# Altium footprint library ICs_VendorSpecific.PcbLib: 247 footprints (part 14 of 19)
Each footprint in its own frame and in the unit in brackets; x right, y up, seen from the top. Pads: shape width x height; smd on the part's side, far side on the other; paste and mask are expansions set on the pad; w line width, h text height; cw(c..) or ccw(c..) is an arc to the next point about the centre after c.
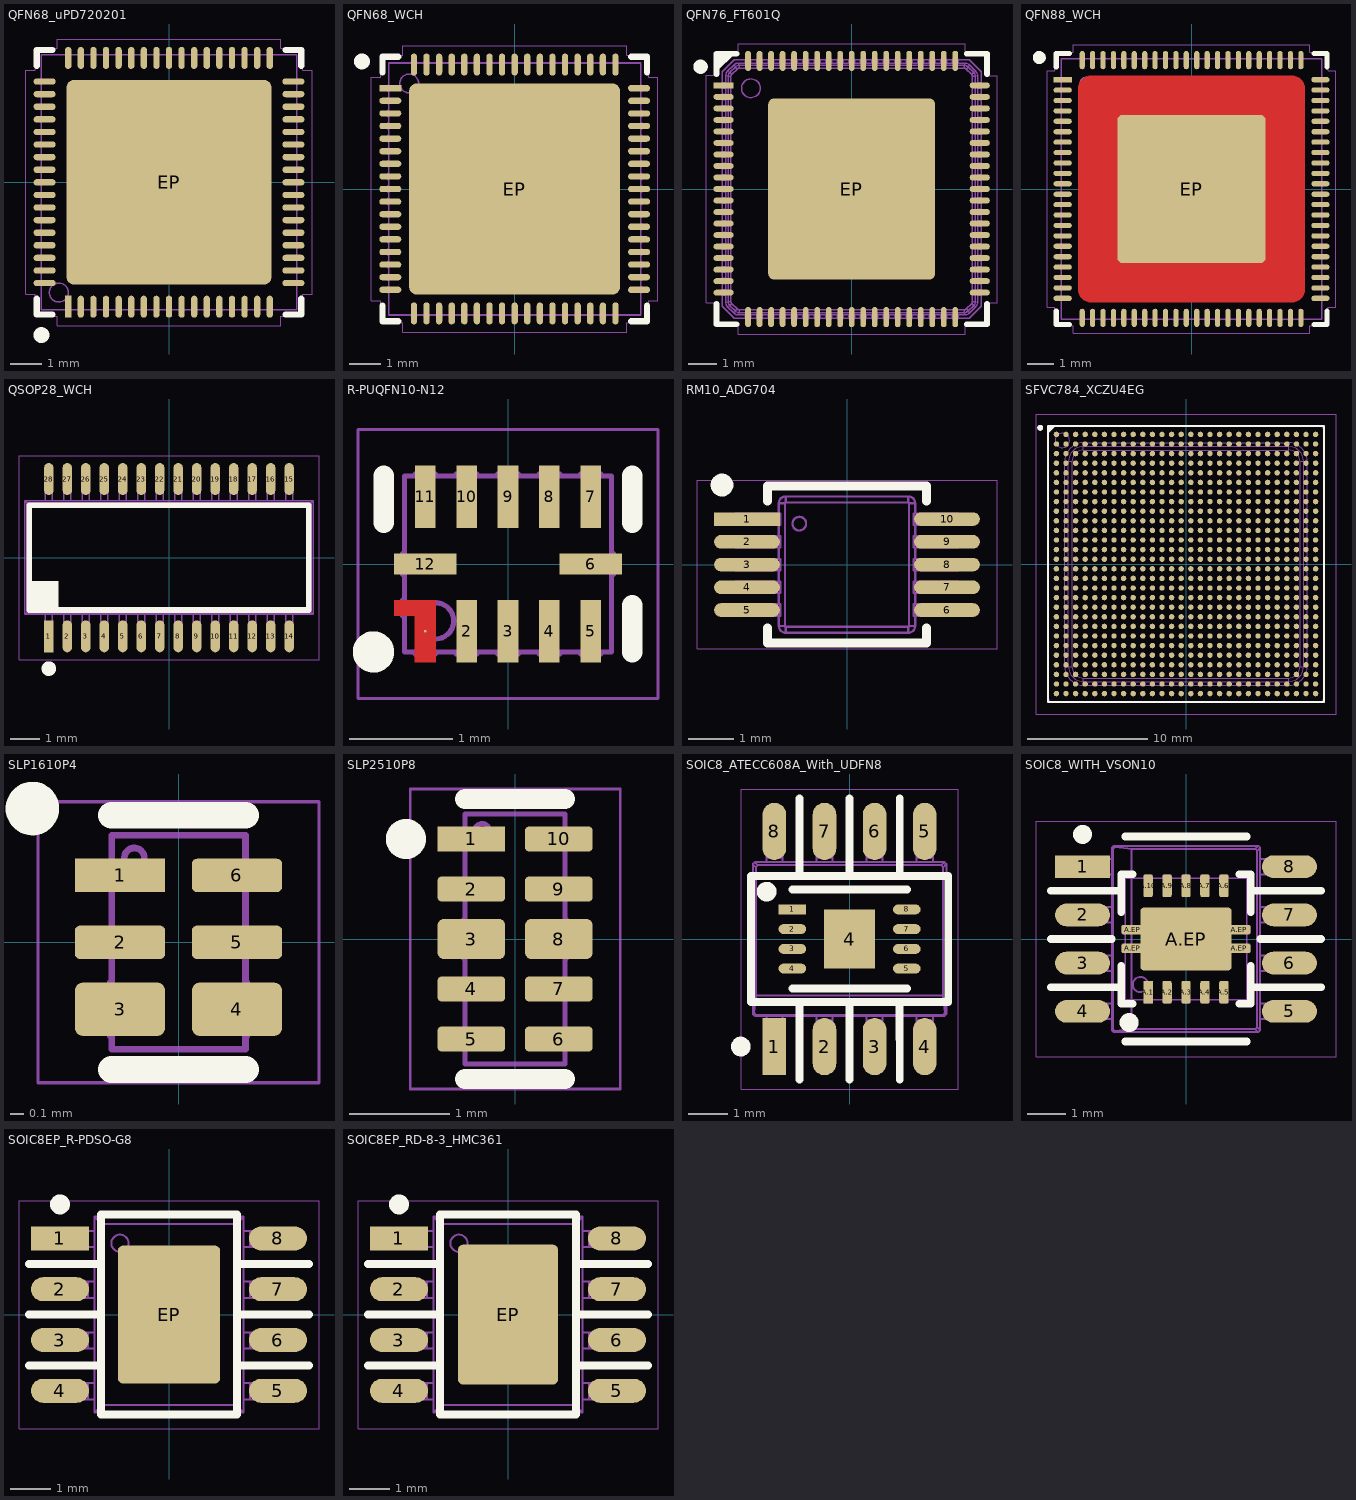
[diagram p13: the footprints below, top view; thin cyan lines are the x and y axes]

## QFN68_uPD720201 [mm] "QFN68, 8x8mm with 0.4mm pitch"
height 1
pads (69):
  rect 0.2x0.7 smd paste+0 mask+0.05: 1(-3.2,-3.95)
  oval 0.2x0.7 smd paste+0 mask+0.05: 2(-2.8,-3.95) 3(-2.4,-3.95) 4(-2,-3.95) 5(-1.6,-3.95) 6(-1.2,-3.95) 7(-0.8,-3.95) 8(-0.4,-3.95) 9(0,-3.95) 10(0.4,-3.95) 11(0.8,-3.95) 12(1.2,-3.95) 13(1.6,-3.95) 14(2,-3.95) 15(2.4,-3.95) 16(2.8,-3.95) 17(3.2,-3.95) 35(3.2,3.95) 36(2.8,3.95) 37(2.4,3.95) 38(2,3.95) 39(1.6,3.95) 40(1.2,3.95) 41(0.8,3.95) 42(0.4,3.95) 43(0,3.95) 44(-0.4,3.95) 45(-0.8,3.95) 46(-1.2,3.95) 47(-1.6,3.95) 48(-2,3.95) 49(-2.4,3.95) 50(-2.8,3.95) 51(-3.2,3.95)
  oval 0.7x0.2 smd paste+0 mask+0.05: 18(3.95,-3.2) 19(3.95,-2.8) 20(3.95,-2.4) 21(3.95,-2) 22(3.95,-1.6) 23(3.95,-1.2) 24(3.95,-0.8) 25(3.95,-0.4) 26(3.95,0) 27(3.95,0.4) 28(3.95,0.8) 29(3.95,1.2) 30(3.95,1.6) 31(3.95,2) 32(3.95,2.4) 33(3.95,2.8) 34(3.95,3.2) 52(-3.95,3.2) 53(-3.95,2.8) 54(-3.95,2.4) 55(-3.95,2) 56(-3.95,1.6) 57(-3.95,1.2) 58(-3.95,0.8) 59(-3.95,0.4) 60(-3.95,0) 61(-3.95,-0.4) 62(-3.95,-0.8) 63(-3.95,-1.2) 64(-3.95,-1.6) 65(-3.95,-2) 66(-3.95,-2.4) 67(-3.95,-2.8) 68(-3.95,-3.2)
  rrect7% 6.5x6.5 smd paste-50 mask+0.05: EP(0,0)
Top Overlay:
  circle w0.25: c-4.05,-4.85 r0.125
  lines w0.2: -4.2,-3.7 -4.2,-4.2 -3.7,-4.2 ; -4.2,3.7 -4.2,4.2 -3.7,4.2 ; 3.7,-4.2 4.2,-4.2 4.2,-3.7 ; 3.7,4.2 4.2,4.2 4.2,3.7
Top Paste:
  region: 2.7,2.7 2.2,2.7 2.2,2.2 2.7,2.2
  region: 2.7,-2.2 2.2,-2.2 2.2,-2.7 2.7,-2.7
  region: 2.7,-1.5 2.2,-1.5 2.2,-2 2.7,-2
  region: 2.7,-0.8 2.2,-0.8 2.2,-1.3 2.7,-1.3
  region: 2.7,1.3 2.2,1.3 2.2,0.8 2.7,0.8
  region: 2.7,2 2.2,2 2.2,1.5 2.7,1.5
  region: 2.7,-0.1 2.2,-0.1 2.2,-0.6 2.7,-0.6
  region: 2.7,0.6 2.2,0.6 2.2,0.1 2.7,0.1
  rectangle: -2.7,-2.7 -2.2,-2.2
  rectangle: -2.7,2.2 -2.2,2.7
  rectangle: -2.7,1.5 -2.2,2
  rectangle: -2.7,0.8 -2.2,1.3
  rectangle: -2.7,-1.3 -2.2,-0.8
  rectangle: -2.7,-2 -2.2,-1.5
  rectangle: -2.7,0.1 -2.2,0.6
  rectangle: -2.7,-0.6 -2.2,-0.1
  region: -0.8,-2.2 -1.3,-2.2 -1.3,-2.7 -0.8,-2.7
  rectangle: -2,-2.7 -1.5,-2.2
  region: 2,-2.2 1.5,-2.2 1.5,-2.7 2,-2.7
  rectangle: 0.8,-2.7 1.3,-2.2
  region: 0.6,-2.2 0.1,-2.2 0.1,-2.7 0.6,-2.7
  rectangle: -0.6,-2.7 -0.1,-2.2
  rectangle: 0.8,2.2 1.3,2.7
  region: 2,2.7 1.5,2.7 1.5,2.2 2,2.2
  rectangle: -2,2.2 -1.5,2.7
  region: -0.8,2.7 -1.3,2.7 -1.3,2.2 -0.8,2.2
  rectangle: -0.6,2.2 -0.1,2.7
  region: 0.6,2.7 0.1,2.7 0.1,2.2 0.6,2.2
  rectangle: 0.8,1.5 1.3,2
  rectangle: 0.8,0.8 1.3,1.3
  region: 2,1.3 1.5,1.3 1.5,0.8 2,0.8
  region: 2,2 1.5,2 1.5,1.5 2,1.5
  rectangle: 0.8,-1.3 1.3,-0.8
  rectangle: 0.8,-2 1.3,-1.5
  region: 2,-1.5 1.5,-1.5 1.5,-2 2,-2
  region: 2,-0.8 1.5,-0.8 1.5,-1.3 2,-1.3
  rectangle: 0.8,0.1 1.3,0.6
  rectangle: 0.8,-0.6 1.3,-0.1
  region: 2,-0.1 1.5,-0.1 1.5,-0.6 2,-0.6
  region: 2,0.6 1.5,0.6 1.5,0.1 2,0.1
  rectangle: -2,1.5 -1.5,2
  rectangle: -2,0.8 -1.5,1.3
  region: -0.8,1.3 -1.3,1.3 -1.3,0.8 -0.8,0.8
  region: -0.8,2 -1.3,2 -1.3,1.5 -0.8,1.5
  rectangle: -2,-1.3 -1.5,-0.8
  rectangle: -2,-2 -1.5,-1.5
  region: -0.8,-1.5 -1.3,-1.5 -1.3,-2 -0.8,-2
  region: -0.8,-0.8 -1.3,-0.8 -1.3,-1.3 -0.8,-1.3
  rectangle: -2,0.1 -1.5,0.6
  rectangle: -2,-0.6 -1.5,-0.1
  region: -0.8,-0.1 -1.3,-0.1 -1.3,-0.6 -0.8,-0.6
  region: -0.8,0.6 -1.3,0.6 -1.3,0.1 -0.8,0.1
  rectangle: -0.6,1.5 -0.1,2
  rectangle: -0.6,0.8 -0.1,1.3
  region: 0.6,1.3 0.1,1.3 0.1,0.8 0.6,0.8
  region: 0.6,2 0.1,2 0.1,1.5 0.6,1.5
  rectangle: -0.6,-1.3 -0.1,-0.8
  rectangle: -0.6,-2 -0.1,-1.5
  region: 0.6,-1.5 0.1,-1.5 0.1,-2 0.6,-2
  region: 0.6,-0.8 0.1,-0.8 0.1,-1.3 0.6,-1.3
  rectangle: -0.6,0.1 -0.1,0.6
  rectangle: -0.6,-0.6 -0.1,-0.1
  region: 0.6,-0.1 0.1,-0.1 0.1,-0.6 0.6,-0.6
  region: 0.6,0.6 0.1,0.6 0.1,0.1 0.6,0.1
Top Courtyard:
  lines w0.025: -4.55,-3.55 -4.55,3.55 -4.25,3.55 -4.25,4.25 -3.55,4.25 -3.55,4.55 3.55,4.55 3.55,4.25 4.25,4.25 4.25,3.55 4.55,3.55 4.55,-3.55 4.25,-3.55 4.25,-4.25 3.55,-4.25 3.55,-4.55 -3.55,-4.55 -3.55,-4.25 -4.25,-4.25 -4.25,-3.55 -4.55,-3.55
Top Assembly:
  drawing of 209 lines, arcs and shapes, not listed
  text ".Designator" at -4.511,-0.453 h2
3D body "uPD720201.STEP": height 0.9, standoff 0, extent -4.025,-4.025 4.025,4.025

## QFN68_WCH [mm] "QFN68, 8x8mm with 0.4mm pitch"
height 0.75
pads (69):
  rect 0.7x0.2 smd paste+0 mask+0.05: 1(-3.95,3.2)
  oval 0.7x0.2 smd paste+0 mask+0.05: 2(-3.95,2.8) 3(-3.95,2.4) 4(-3.95,2) 5(-3.95,1.6) 6(-3.95,1.2) 7(-3.95,0.8) 8(-3.95,0.4) 9(-3.95,0) 10(-3.95,-0.4) 11(-3.95,-0.8) 12(-3.95,-1.2) 13(-3.95,-1.6) 14(-3.95,-2) 15(-3.95,-2.4) 16(-3.95,-2.8) 17(-3.95,-3.2) 35(3.95,-3.2) 36(3.95,-2.8) 37(3.95,-2.4) 38(3.95,-2) 39(3.95,-1.6) 40(3.95,-1.2) 41(3.95,-0.8) 42(3.95,-0.4) 43(3.95,0) 44(3.95,0.4) 45(3.95,0.8) 46(3.95,1.2) 47(3.95,1.6) 48(3.95,2) 49(3.95,2.4) 50(3.95,2.8) 51(3.95,3.2)
  oval 0.2x0.7 smd paste+0 mask+0.05: 18(-3.2,-3.95) 19(-2.8,-3.95) 20(-2.4,-3.95) 21(-2,-3.95) 22(-1.6,-3.95) 23(-1.2,-3.95) 24(-0.8,-3.95) 25(-0.4,-3.95) 26(0,-3.95) 27(0.4,-3.95) 28(0.8,-3.95) 29(1.2,-3.95) 30(1.6,-3.95) 31(2,-3.95) 32(2.4,-3.95) 33(2.8,-3.95) 34(3.2,-3.95) 52(3.2,3.95) 53(2.8,3.95) 54(2.4,3.95) 55(2,3.95) 56(1.6,3.95) 57(1.2,3.95) 58(0.8,3.95) 59(0.4,3.95) 60(0,3.95) 61(-0.4,3.95) 62(-0.8,3.95) 63(-1.2,3.95) 64(-1.6,3.95) 65(-2,3.95) 66(-2.4,3.95) 67(-2.8,3.95) 68(-3.2,3.95)
  rrect7% 6.7x6.7 smd paste-50 mask+0.05: EP(0,0)
Top Overlay:
  circle w0.25: c-4.85,4.05 r0.125
  lines w0.2: -4.2,-3.7 -4.2,-4.2 -3.7,-4.2 ; -4.2,3.7 -4.2,4.2 -3.7,4.2 ; 3.7,-4.2 4.2,-4.2 4.2,-3.7 ; 3.7,4.2 4.2,4.2 4.2,3.7
Top Paste:
  region: 0.15,0.95 0.15,0.15 0.95,0.15 0.95,0.95
  region: -0.95,0.95 -0.95,0.15 -0.15,0.15 -0.15,0.95
  region: -0.15,-0.95 -0.15,-0.15 -0.95,-0.15 -0.95,-0.95
  region: 0.95,-0.95 0.95,-0.15 0.15,-0.15 0.15,-0.95
  region: 0.15,2.05 0.15,1.25 0.95,1.25 0.95,2.05
  region: -0.95,2.05 -0.95,1.25 -0.15,1.25 -0.15,2.05
  region: 0.15,3.15 0.15,2.35 0.95,2.35 0.95,3.15
  region: -0.95,3.15 -0.95,2.35 -0.15,2.35 -0.15,3.15
  region: -0.15,-2.05 -0.15,-1.25 -0.95,-1.25 -0.95,-2.05
  region: 0.95,-2.05 0.95,-1.25 0.15,-1.25 0.15,-2.05
  region: -0.15,-3.15 -0.15,-2.35 -0.95,-2.35 -0.95,-3.15
  region: 0.95,-3.15 0.95,-2.35 0.15,-2.35 0.15,-3.15
  region: 1.25,0.95 1.25,0.15 2.05,0.15 2.05,0.95
  region: 2.05,-0.95 2.05,-0.15 1.25,-0.15 1.25,-0.95
  region: 1.25,2.05 1.25,1.25 2.05,1.25 2.05,2.05
  region: 1.25,3.15 1.25,2.35 2.05,2.35 2.05,3.15
  region: 2.05,-2.05 2.05,-1.25 1.25,-1.25 1.25,-2.05
  region: 2.05,-3.15 2.05,-2.35 1.25,-2.35 1.25,-3.15
  region: 2.35,0.95 2.35,0.15 3.15,0.15 3.15,0.95
  region: 3.15,-0.95 3.15,-0.15 2.35,-0.15 2.35,-0.95
  region: 2.35,2.05 2.35,1.25 3.15,1.25 3.15,2.05
  region: 2.35,3.15 2.35,2.35 3.15,2.35 3.15,3.15
  region: 3.15,-2.05 3.15,-1.25 2.35,-1.25 2.35,-2.05
  region: 3.15,-3.15 3.15,-2.35 2.35,-2.35 2.35,-3.15
  region: -2.05,0.95 -2.05,0.15 -1.25,0.15 -1.25,0.95
  region: -1.25,-0.95 -1.25,-0.15 -2.05,-0.15 -2.05,-0.95
  region: -2.05,2.05 -2.05,1.25 -1.25,1.25 -1.25,2.05
  region: -2.05,3.15 -2.05,2.35 -1.25,2.35 -1.25,3.15
  region: -1.25,-2.05 -1.25,-1.25 -2.05,-1.25 -2.05,-2.05
  region: -1.25,-3.15 -1.25,-2.35 -2.05,-2.35 -2.05,-3.15
  region: -3.15,0.95 -3.15,0.15 -2.35,0.15 -2.35,0.95
  region: -2.35,-0.95 -2.35,-0.15 -3.15,-0.15 -3.15,-0.95
  region: -3.15,2.05 -3.15,1.25 -2.35,1.25 -2.35,2.05
  region: -3.15,3.15 -3.15,2.35 -2.35,2.35 -2.35,3.15
  region: -2.35,-2.05 -2.35,-1.25 -3.15,-1.25 -3.15,-2.05
  region: -2.35,-3.15 -2.35,-2.35 -3.15,-2.35 -3.15,-3.15
Top Courtyard:
  lines w0.025: -4.55,-3.55 -4.55,3.55 -4.25,3.55 -4.25,4.25 -3.55,4.25 -3.55,4.55 3.55,4.55 3.55,4.25 4.25,4.25 4.25,3.55 4.55,3.55 4.55,-3.55 4.25,-3.55 4.25,-4.25 3.55,-4.25 3.55,-4.55 -3.55,-4.55 -3.55,-4.25 -4.25,-4.25 -4.25,-3.55 -4.55,-3.55
Top Assembly:
  drawing of 209 lines, arcs and shapes, not listed
  text ".Designator" at -4.511,-0.453 h2
3D body "QFN-68_WCH.x_t": height 0.78, standoff 0, extent -4.025,-4.025 4.025,4.025

## QFN76_FT601Q [mm] "QFN76, 9x9mm with 0.4mm pitch"
height 1
pads (77):
  rect 0.7x0.2 smd paste+0 mask+0.05: 1(-4.45,3.6)
  oval 0.7x0.2 smd paste+0 mask+0.05: 2(-4.45,3.2) 3(-4.45,2.8) 4(-4.45,2.4) 5(-4.45,2) 6(-4.45,1.6) 7(-4.45,1.2) 8(-4.45,0.8) 9(-4.45,0.4) 10(-4.45,0) 11(-4.45,-0.4) 12(-4.45,-0.8) 13(-4.45,-1.2) 14(-4.45,-1.6) 15(-4.45,-2) 16(-4.45,-2.4) 17(-4.45,-2.8) 18(-4.45,-3.2) 19(-4.45,-3.6) 39(4.45,-3.6) 40(4.45,-3.2) 41(4.45,-2.8) 42(4.45,-2.4) 43(4.45,-2) 44(4.45,-1.6) 45(4.45,-1.2) 46(4.45,-0.8) 47(4.45,-0.4) 48(4.45,0) 49(4.45,0.4) 50(4.45,0.8) 51(4.45,1.2) 52(4.45,1.6) 53(4.45,2) 54(4.45,2.4) 55(4.45,2.8) 56(4.45,3.2) 57(4.45,3.6)
  oval 0.2x0.7 smd paste+0 mask+0.05: 20(-3.6,-4.45) 21(-3.2,-4.45) 22(-2.8,-4.45) 23(-2.4,-4.45) 24(-2,-4.45) 25(-1.6,-4.45) 26(-1.2,-4.45) 27(-0.8,-4.45) 28(-0.4,-4.45) 29(0,-4.45) 30(0.4,-4.45) 31(0.8,-4.45) 32(1.2,-4.45) 33(1.6,-4.45) 34(2,-4.45) 35(2.4,-4.45) 36(2.8,-4.45) 37(3.2,-4.45) 38(3.6,-4.45) 58(3.6,4.45) 59(3.2,4.45) 60(2.8,4.45) 61(2.4,4.45) 62(2,4.45) 63(1.6,4.45) 64(1.2,4.45) 65(0.8,4.45) 66(0.4,4.45) 67(0,4.45) 68(-0.4,4.45) 69(-0.8,4.45) 70(-1.2,4.45) 71(-1.6,4.45) 72(-2,4.45) 73(-2.4,4.45) 74(-2.8,4.45) 75(-3.2,4.45) 76(-3.6,4.45)
  rrect7% 5.8x6.3 smd paste-50 mask+0.05: EP(0,0)
Top Overlay:
  circle w0.25: c-5.25,4.25 r0.125
  lines w0.2: -4.7,-4 -4.7,-4.7 -4,-4.7 ; -4.7,4 -4.7,4.7 -4,4.7 ; -4.7,4.2 -4.2,4.7 ; -4.7,4.4 -4.417,4.683 ; 4,-4.7 4.7,-4.7 4.7,-4 ; 4,4.7 4.7,4.7 4.7,4
Top Paste:
  region: 0.6,3.05 0.1,3.05 0.1,2.55 0.6,2.55
  rectangle: -0.6,2.55 -0.1,3.05
  region: -0.8,3.05 -1.3,3.05 -1.3,2.55 -0.8,2.55
  rectangle: -2,2.55 -1.5,3.05
  region: 2,3.05 1.5,3.05 1.5,2.55 2,2.55
  rectangle: 0.8,2.55 1.3,3.05
  rectangle: -2.7,2.55 -2.2,3.05
  region: 2.7,3.05 2.2,3.05 2.2,2.55 2.7,2.55
  region: 0.6,0.25 0.1,0.25 0.1,-0.25 0.6,-0.25
  region: 0.6,-0.45 0.1,-0.45 0.1,-0.95 0.6,-0.95
  rectangle: -0.6,-0.95 -0.1,-0.45
  rectangle: -0.6,-0.25 -0.1,0.25
  region: 0.6,-1.15 0.1,-1.15 0.1,-1.65 0.6,-1.65
  region: 0.6,-1.85 0.1,-1.85 0.1,-2.35 0.6,-2.35
  rectangle: -0.6,-2.35 -0.1,-1.85
  rectangle: -0.6,-1.65 -0.1,-1.15
  region: 0.6,1.65 0.1,1.65 0.1,1.15 0.6,1.15
  region: 0.6,0.95 0.1,0.95 0.1,0.45 0.6,0.45
  rectangle: -0.6,0.45 -0.1,0.95
  rectangle: -0.6,1.15 -0.1,1.65
  region: -0.8,0.25 -1.3,0.25 -1.3,-0.25 -0.8,-0.25
  region: -0.8,-0.45 -1.3,-0.45 -1.3,-0.95 -0.8,-0.95
  rectangle: -2,-0.95 -1.5,-0.45
  rectangle: -2,-0.25 -1.5,0.25
  region: -0.8,-1.15 -1.3,-1.15 -1.3,-1.65 -0.8,-1.65
  region: -0.8,-1.85 -1.3,-1.85 -1.3,-2.35 -0.8,-2.35
  rectangle: -2,-2.35 -1.5,-1.85
  rectangle: -2,-1.65 -1.5,-1.15
  region: -0.8,1.65 -1.3,1.65 -1.3,1.15 -0.8,1.15
  region: -0.8,0.95 -1.3,0.95 -1.3,0.45 -0.8,0.45
  rectangle: -2,0.45 -1.5,0.95
  rectangle: -2,1.15 -1.5,1.65
  region: 2,0.25 1.5,0.25 1.5,-0.25 2,-0.25
  region: 2,-0.45 1.5,-0.45 1.5,-0.95 2,-0.95
  rectangle: 0.8,-0.95 1.3,-0.45
  rectangle: 0.8,-0.25 1.3,0.25
  region: 2,-1.15 1.5,-1.15 1.5,-1.65 2,-1.65
  region: 2,-1.85 1.5,-1.85 1.5,-2.35 2,-2.35
  rectangle: 0.8,-2.35 1.3,-1.85
  rectangle: 0.8,-1.65 1.3,-1.15
  region: 2,1.65 1.5,1.65 1.5,1.15 2,1.15
  region: 2,0.95 1.5,0.95 1.5,0.45 2,0.45
  rectangle: 0.8,0.45 1.3,0.95
  rectangle: 0.8,1.15 1.3,1.65
  region: 0.6,2.35 0.1,2.35 0.1,1.85 0.6,1.85
  rectangle: -0.6,1.85 -0.1,2.35
  region: -0.8,2.35 -1.3,2.35 -1.3,1.85 -0.8,1.85
  rectangle: -2,1.85 -1.5,2.35
  region: 2,2.35 1.5,2.35 1.5,1.85 2,1.85
  rectangle: 0.8,1.85 1.3,2.35
  rectangle: -0.6,-3.05 -0.1,-2.55
  region: 0.6,-2.55 0.1,-2.55 0.1,-3.05 0.6,-3.05
  rectangle: 0.8,-3.05 1.3,-2.55
  region: 2,-2.55 1.5,-2.55 1.5,-3.05 2,-3.05
  rectangle: -2,-3.05 -1.5,-2.55
  region: -0.8,-2.55 -1.3,-2.55 -1.3,-3.05 -0.8,-3.05
  rectangle: -2.7,-0.95 -2.2,-0.45
  rectangle: -2.7,-0.25 -2.2,0.25
  rectangle: -2.7,-2.35 -2.2,-1.85
  rectangle: -2.7,-1.65 -2.2,-1.15
  rectangle: -2.7,0.45 -2.2,0.95
  rectangle: -2.7,1.15 -2.2,1.65
  rectangle: -2.7,1.85 -2.2,2.35
  rectangle: -2.7,-3.05 -2.2,-2.55
  region: 2.7,0.25 2.2,0.25 2.2,-0.25 2.7,-0.25
  region: 2.7,-0.45 2.2,-0.45 2.2,-0.95 2.7,-0.95
  region: 2.7,1.65 2.2,1.65 2.2,1.15 2.7,1.15
  region: 2.7,0.95 2.2,0.95 2.2,0.45 2.7,0.45
  region: 2.7,-1.15 2.2,-1.15 2.2,-1.65 2.7,-1.65
  region: 2.7,-1.85 2.2,-1.85 2.2,-2.35 2.7,-2.35
  region: 2.7,-2.55 2.2,-2.55 2.2,-3.05 2.7,-3.05
  region: 2.7,2.35 2.2,2.35 2.2,1.85 2.7,1.85
Top Courtyard:
  lines w0.025: -5.05,-3.95 -4.7,-3.95 -4.7,-4.7 -3.95,-4.7 -3.95,-5.05 3.95,-5.05 3.95,-4.7 4.7,-4.7 4.7,-3.95 5.05,-3.95 5.05,3.942 4.7,3.942 4.7,4.7 3.95,4.7 3.95,5.05 -3.95,5.05 -3.95,4.7 -4.7,4.7 -4.7,3.95 -5.05,3.95 -5.05,-3.95
Top Assembly:
  drawing of 393 lines, arcs and shapes, not listed
  text ".Designator" at -4.511,-0.453 h2
3D body "QFN76_FT601Q.x_t": height 0.86, standoff 0, extent -4.51,-4.51 4.51,4.51

## QFN88_WCH [mm] "QFN88, 10x10mm with 0.4mm pitch"
height 0.85
pads (89):
  rect 0.7x0.2 smd paste+0 mask+0.05: 1(-4.95,4.2)
  oval 0.7x0.2 smd paste+0 mask+0.05: 2(-4.95,3.8) 3(-4.95,3.4) 4(-4.95,3) 5(-4.95,2.6) 6(-4.95,2.2) 7(-4.95,1.8) 8(-4.95,1.4) 9(-4.95,1) 10(-4.95,0.6) 11(-4.95,0.2) 12(-4.95,-0.2) 13(-4.95,-0.6) 14(-4.95,-1) 15(-4.95,-1.4) 16(-4.95,-1.8) 17(-4.95,-2.2) 18(-4.95,-2.6) 19(-4.95,-3) 20(-4.95,-3.4) 21(-4.95,-3.8) 22(-4.95,-4.2) 45(4.95,-4.2) 46(4.95,-3.8) 47(4.95,-3.4) 48(4.95,-3) 49(4.95,-2.6) 50(4.95,-2.2) 51(4.95,-1.8) 52(4.95,-1.4) 53(4.95,-1) 54(4.95,-0.6) 55(4.95,-0.2) 56(4.95,0.2) 57(4.95,0.6) 58(4.95,1) 59(4.95,1.4) 60(4.95,1.8) 61(4.95,2.2) 62(4.95,2.6) 63(4.95,3) 64(4.95,3.4) 65(4.95,3.8) 66(4.95,4.2)
  oval 0.2x0.7 smd paste+0 mask+0.05: 23(-4.2,-4.95) 24(-3.8,-4.95) 25(-3.4,-4.95) 26(-3,-4.95) 27(-2.6,-4.95) 28(-2.2,-4.95) 29(-1.8,-4.95) 30(-1.4,-4.95) 31(-1,-4.95) 32(-0.6,-4.95) 33(-0.2,-4.95) 34(0.2,-4.95) 35(0.6,-4.95) 36(1,-4.95) 37(1.4,-4.95) 38(1.8,-4.95) 39(2.2,-4.95) 40(2.6,-4.95) 41(3,-4.95) 42(3.4,-4.95) 43(3.8,-4.95) 44(4.2,-4.95) 67(4.2,4.95) 68(3.8,4.95) 69(3.4,4.95) 70(3,4.95) 71(2.6,4.95) 72(2.2,4.95) 73(1.8,4.95) 74(1.4,4.95) 75(1,4.95) 76(0.6,4.95) 77(0.2,4.95) 78(-0.2,4.95) 79(-0.6,4.95) 80(-1,4.95) 81(-1.4,4.95) 82(-1.8,4.95) 83(-2.2,4.95) 84(-2.6,4.95) 85(-3,4.95) 86(-3.4,4.95) 87(-3.8,4.95) 88(-4.2,4.95)
  rrect7% 5.7x5.7 smd paste-50 mask+0.05: EP(0,0)
Top Layer:
  pour cut-out: -4.35,3.85 -4.35,-3.85 -4.35,-3.949 -4.274,-4.133 -4.133,-4.274 -3.949,-4.35 -3.85,-4.35 3.85,-4.35 3.949,-4.35 4.133,-4.274 4.274,-4.133 4.35,-3.949 4.35,-3.85 4.35,3.85 4.35,3.949 4.274,4.133 4.133,4.274 3.949,4.35 3.85,4.35 -3.85,4.35 -3.949,4.35 -4.133,4.274 -4.274,4.133 -4.35,3.949
Top Overlay:
  circle w0.25: c-5.85,5.05 r0.125
  lines w0.2: -5.2,-4.7 -5.2,-5.2 -4.7,-5.2 ; -5.2,4.7 -5.2,5.2 -4.7,5.2 ; 4.7,-5.2 5.2,-5.2 5.2,-4.7 ; 4.7,5.2 5.2,5.2 5.2,4.7
Top Paste:
  region: -1.8,-2.6 -1.8,-1.8 -2.6,-1.8 -2.6,-2.6
  region: -2.6,2.6 -2.6,1.8 -1.8,1.8 -1.8,2.6
  region: -2.6,1.5 -2.6,0.7 -1.8,0.7 -1.8,1.5
  region: -1.8,-1.5 -1.8,-0.7 -2.6,-0.7 -2.6,-1.5
  region: -2.6,0.4 -2.6,-0.4 -1.8,-0.4 -1.8,0.4
  region: -0.7,-2.6 -0.7,-1.8 -1.5,-1.8 -1.5,-2.6
  region: -1.5,2.6 -1.5,1.8 -0.7,1.8 -0.7,2.6
  region: -1.5,1.5 -1.5,0.7 -0.7,0.7 -0.7,1.5
  region: -0.7,-1.5 -0.7,-0.7 -1.5,-0.7 -1.5,-1.5
  region: -1.5,0.4 -1.5,-0.4 -0.7,-0.4 -0.7,0.4
  region: 2.6,-2.6 2.6,-1.8 1.8,-1.8 1.8,-2.6
  region: 1.8,2.6 1.8,1.8 2.6,1.8 2.6,2.6
  region: 1.8,1.5 1.8,0.7 2.6,0.7 2.6,1.5
  region: 2.6,-1.5 2.6,-0.7 1.8,-0.7 1.8,-1.5
  region: 1.8,0.4 1.8,-0.4 2.6,-0.4 2.6,0.4
  region: 1.5,-2.6 1.5,-1.8 0.7,-1.8 0.7,-2.6
  region: 0.4,-2.6 0.4,-1.8 -0.4,-1.8 -0.4,-2.6
  region: -0.4,2.6 -0.4,1.8 0.4,1.8 0.4,2.6
  region: 0.7,2.6 0.7,1.8 1.5,1.8 1.5,2.6
  region: -0.4,1.5 -0.4,0.7 0.4,0.7 0.4,1.5
  region: 0.7,1.5 0.7,0.7 1.5,0.7 1.5,1.5
  region: 1.5,-1.5 1.5,-0.7 0.7,-0.7 0.7,-1.5
  region: 0.4,-1.5 0.4,-0.7 -0.4,-0.7 -0.4,-1.5
  region: -0.4,0.4 -0.4,-0.4 0.4,-0.4 0.4,0.4
  region: 0.7,0.4 0.7,-0.4 1.5,-0.4 1.5,0.4
Top Courtyard:
  lines w0.025: -5.55,-4.55 -5.25,-4.55 -5.25,-5.25 -4.55,-5.25 -4.55,-5.55 4.55,-5.55 4.55,-5.25 5.25,-5.25 5.25,-4.55 5.55,-4.55 5.55,4.55 5.25,4.55 5.25,5.25 4.55,5.25 4.55,5.55 -4.55,5.55 -4.55,5.25 -5.25,5.25 -5.25,4.55 -5.55,4.55 -5.55,-4.55
Top Assembly:
  drawing of 269 lines, arcs and shapes, not listed
  text ".Designator" at -4.511,-0.453 h2
3D body "QFN88_WCH.x_t": height 0.88, standoff 0, extent -5.025,-5.025 5.025,5.025

## QSOP28_WCH [mm] "QSOP-28 with 0.635mm pitch"
height 1
pads (28):
  rect 0.32x1.1 smd paste+0 mask+0.05: 1(-4.128,-2.7)
  oval 0.32x1.1 smd paste+0 mask+0.05: 2(-3.493,-2.7) 3(-2.858,-2.7) 4(-2.223,-2.7) 5(-1.588,-2.7) 6(-0.953,-2.7) 7(-0.318,-2.7) 8(0.317,-2.7) 9(0.952,-2.7) 10(1.587,-2.7) 11(2.222,-2.7) 12(2.857,-2.7) 13(3.492,-2.7) 14(4.127,-2.7) 15(4.127,2.7) 16(3.492,2.7) 17(2.857,2.7) 18(2.222,2.7) 19(1.587,2.7) 20(0.952,2.7) 21(0.317,2.7) 22(-0.318,2.7) 23(-0.953,2.7) 24(-1.588,2.7) 25(-2.223,2.7) 26(-2.858,2.7) 27(-3.493,2.7) 28(-4.127,2.7)
Top Overlay:
  circle w0.25: c-4.127,-3.81 r0.125
  rectangle: -4.8,-1.8 -3.8,-0.8
  lines w0.2: -4.8,-1.8 4.8,-1.8 4.8,1.8 -4.8,1.8 -4.8,-1.8
Top Courtyard:
  lines w0.025: -5.15,-3.5 5.15,-3.5 5.15,3.5 -5.15,3.5 -5.15,-3.5
Top Assembly:
  drawing of 489 lines, arcs and shapes, not listed
  text ".Designator" at -4.511,-0.453 h2
3D body "QSOP28.x_t": height 1.55, standoff 0, extent -4.95,-3 4.95,3

## R-PUQFN10-N12 [mm] "QFN, 12 leads, 1.7mm x 2mm, 0.4mm pitch. TI case R-PUQFN10-N12"
height 0.55
pads (12):
  round 0.025 smd paste-0.025 mask+0.05: 1(-0.8,-0.65)
  rect 0.2x0.6 smd paste-0.025 mask+0.05: 2(-0.4,-0.65) 3(0,-0.65) 4(0.4,-0.65) 7(0.8,0.65) 8(0.4,0.65) 9(0,0.65) 10(-0.4,0.65) 11(-0.8,0.65)
  rect 0.2x0.6 smd paste+0 mask+0.05: 5(0.8,-0.65)
  rect 0.6x0.2 smd paste-0.025 mask+0.05: 6(0.8,0) 12(-0.8,0)
Top Layer:
  region: -0.9,-0.95 -0.7,-0.95 -0.7,-0.35 -0.85,-0.35 -1.1,-0.35 -1.1,-0.5 -0.9,-0.5
Top Overlay:
  circle w0.2: c-1.3,-0.85 r0.1
  lines w0.2: -1.2,0.4 -1.2,0.85 ; 1.2,-0.85 1.2,-0.4 ; 1.2,0.4 1.2,0.85
Top Courtyard:
  lines w0.025: -1.45,-1.3 -1.45,1.3 1.45,1.3 1.45,-1.3 -1.45,-1.3
Top Assembly:
  circle w0.05: c-0.7,-0.55 r0.175
  lines w0.05: -1,-0.5 -1.02,-0.5 -1.02,-0.35 -1,-0.35 ; -1,-0.1 -1.02,-0.1 -1.02,0.1 -1,0.1 ; -0.9,-0.85 -0.9,-0.87 -0.7,-0.87 -0.7,-0.85 ; -0.9,0.85 -0.9,0.87 -0.7,0.87 -0.7,0.85 ; -0.5,-0.85 -0.5,-0.87 -0.3,-0.87 -0.3,-0.85 ; -0.5,0.85 -0.5,0.87 -0.3,0.87 -0.3,0.85 ; -0.1,-0.85 -0.1,-0.87 0.1,-0.87 0.1,-0.85 ; -0.1,0.85 -0.1,0.87 0.1,0.87 0.1,0.85 ; 0.3,-0.85 0.3,-0.87 0.5,-0.87 0.5,-0.85 ; 0.3,0.85 0.3,0.87 0.5,0.87 0.5,0.85 ; 0.7,-0.85 0.7,-0.87 0.9,-0.87 0.9,-0.85 ; 0.7,0.85 0.7,0.87 0.9,0.87 0.9,0.85 ; 1,-0.1 1.02,-0.1 1.02,0.1 1,0.1 ; -1,-0.85 -1,0.85 1,0.85 1,-0.85 -1,-0.85
  text ".Designator" at -2.252,-0.226 h1
3D body "R-PUQFN12-N12.x_t": height 0.52, standoff 0, extent -1.02,-0.87 1.02,0.87

## RM10_ADG704 [mm] "uSOIC-10, 10-Leads, Body 3.00x3.00mm, Pitch 0.5mm, AD Reference RM-10"
height 0.85
pads (10):
  rect 1.45x0.3 smd paste+0 mask+0.05: 1(-2.2,1)
  oval 1.45x0.3 smd paste+0 mask+0.05: 2(-2.2,0.5) 3(-2.2,0) 4(-2.2,-0.5) 5(-2.2,-1) 6(2.2,-1) 7(2.2,-0.5) 8(2.2,0) 9(2.2,0.5) 10(2.2,1)
Top Overlay:
  circle w0.25: c-2.75,1.75 r0.125
  lines w0.2: -1.75,-1.4 -1.75,-1.725 1.75,-1.725 1.75,-1.4 ; -1.75,1.4 -1.75,1.725 1.75,1.725 1.75,1.4
Top Courtyard:
  lines w0.025: -3.3,-1.85 3.3,-1.85 3.3,1.85 -3.3,1.85 -3.3,-1.85
Top Assembly:
  drawing of 195 lines, arcs and shapes, not listed
  text ".Designator" at -3.378,-0.339 h1.5
3D body "ADG704_RM10.x_t": height 0.93, standoff 0, extent -2.45,-1.5 2.45,1.5

## SFVC784_XCZU4EG [mm] "BGA, 784-Leads, Body 23,00x23,00mmx3,12mm, Pitch 0,80mm"
height 3.12
pads (784):
  round 0.45 smd mask+0.05: A1(-10.8,10.8) A2(-10,10.8) A3(-9.2,10.8) A4(-8.4,10.8) A5(-7.6,10.8) A6(-6.8,10.8) A7(-6,10.8) A8(-5.2,10.8) A9(-4.4,10.8) A10(-3.6,10.8) A11(-2.8,10.8) A12(-2,10.8) A13(-1.2,10.8) A14(-0.4,10.8) A15(0.4,10.8) A16(1.2,10.8) A17(2,10.8) A18(2.8,10.8) A19(3.6,10.8) A20(4.4,10.8) A21(5.2,10.8) A22(6,10.8) A23(6.8,10.8) A24(7.6,10.8) A25(8.4,10.8) A26(9.2,10.8) A27(10,10.8) A28(10.8,10.8) AA1(-10.8,-5.2) AA2(-10,-5.2) AA3(-9.2,-5.2) AA4(-8.4,-5.2) AA5(-7.6,-5.2) AA6(-6.8,-5.2) AA7(-6,-5.2) AA8(-5.2,-5.2) AA9(-4.4,-5.2) AA10(-3.6,-5.2) AA11(-2.8,-5.2) AA12(-2,-5.2) AA13(-1.2,-5.2) AA14(-0.4,-5.2) AA15(0.4,-5.2) AA16(1.2,-5.2) AA17(2,-5.2) AA18(2.8,-5.2) AA19(3.6,-5.2) AA20(4.4,-5.2) AA21(5.2,-5.2) AA22(6,-5.2) AA23(6.8,-5.2) AA24(7.6,-5.2) AA25(8.4,-5.2) AA26(9.2,-5.2) AA27(10,-5.2) AA28(10.8,-5.2) AB1(-10.8,-6) AB2(-10,-6) AB3(-9.2,-6) AB4(-8.4,-6) AB5(-7.6,-6) AB6(-6.8,-6) AB7(-6,-6) AB8(-5.2,-6) AB9(-4.4,-6) AB10(-3.6,-6) AB11(-2.8,-6) AB12(-2,-6) AB13(-1.2,-6) AB14(-0.4,-6) AB15(0.4,-6) AB16(1.2,-6) AB17(2,-6) AB18(2.8,-6) AB19(3.6,-6) AB20(4.4,-6) AB21(5.2,-6) AB22(6,-6) AB23(6.8,-6) AB24(7.6,-6) AB25(8.4,-6) AB26(9.2,-6) AB27(10,-6) AB28(10.8,-6) AC1(-10.8,-6.8) AC2(-10,-6.8) AC3(-9.2,-6.8) AC4(-8.4,-6.8) AC5(-7.6,-6.8) AC6(-6.8,-6.8) AC7(-6,-6.8) AC8(-5.2,-6.8) AC9(-4.4,-6.8) AC10(-3.6,-6.8) AC11(-2.8,-6.8) AC12(-2,-6.8) AC13(-1.2,-6.8) AC14(-0.4,-6.8) AC15(0.4,-6.8) AC16(1.2,-6.8) AC17(2,-6.8) AC18(2.8,-6.8) AC19(3.6,-6.8) AC20(4.4,-6.8) AC21(5.2,-6.8) AC22(6,-6.8) AC23(6.8,-6.8) AC24(7.6,-6.8) AC25(8.4,-6.8) AC26(9.2,-6.8) AC27(10,-6.8) AC28(10.8,-6.8) AD1(-10.8,-7.6) AD2(-10,-7.6) AD3(-9.2,-7.6) AD4(-8.4,-7.6) AD5(-7.6,-7.6) AD6(-6.8,-7.6) AD7(-6,-7.6) AD8(-5.2,-7.6) AD9(-4.4,-7.6) AD10(-3.6,-7.6) AD11(-2.8,-7.6) AD12(-2,-7.6) AD13(-1.2,-7.6) AD14(-0.4,-7.6) AD15(0.4,-7.6) AD16(1.2,-7.6) AD17(2,-7.6) AD18(2.8,-7.6) AD19(3.6,-7.6) AD20(4.4,-7.6) AD21(5.2,-7.6) AD22(6,-7.6) AD23(6.8,-7.6) AD24(7.6,-7.6) AD25(8.4,-7.6) AD26(9.2,-7.6) AD27(10,-7.6) AD28(10.8,-7.6) AE1(-10.8,-8.4) AE2(-10,-8.4) AE3(-9.2,-8.4) AE4(-8.4,-8.4) AE5(-7.6,-8.4) AE6(-6.8,-8.4) AE7(-6,-8.4) AE8(-5.2,-8.4) AE9(-4.4,-8.4) AE10(-3.6,-8.4) AE11(-2.8,-8.4) AE12(-2,-8.4) AE13(-1.2,-8.4) AE14(-0.4,-8.4) AE15(0.4,-8.4) AE16(1.2,-8.4) AE17(2,-8.4) AE18(2.8,-8.4) AE19(3.6,-8.4) AE20(4.4,-8.4) AE21(5.2,-8.4) AE22(6,-8.4) AE23(6.8,-8.4) AE24(7.6,-8.4) AE25(8.4,-8.4) AE26(9.2,-8.4) AE27(10,-8.4) AE28(10.8,-8.4) AF1(-10.8,-9.2) AF2(-10,-9.2) AF3(-9.2,-9.2) AF4(-8.4,-9.2) AF5(-7.6,-9.2) AF6(-6.8,-9.2) AF7(-6,-9.2) AF8(-5.2,-9.2) AF9(-4.4,-9.2) AF10(-3.6,-9.2) AF11(-2.8,-9.2) AF12(-2,-9.2) AF13(-1.2,-9.2) AF14(-0.4,-9.2) AF15(0.4,-9.2) AF16(1.2,-9.2) AF17(2,-9.2) AF18(2.8,-9.2) AF19(3.6,-9.2) AF20(4.4,-9.2) AF21(5.2,-9.2) AF22(6,-9.2) AF23(6.8,-9.2) AF24(7.6,-9.2) AF25(8.4,-9.2) AF26(9.2,-9.2) AF27(10,-9.2) AF28(10.8,-9.2) AG1(-10.8,-10) AG2(-10,-10) AG3(-9.2,-10) AG4(-8.4,-10) AG5(-7.6,-10) AG6(-6.8,-10) AG7(-6,-10) AG8(-5.2,-10) AG9(-4.4,-10) AG10(-3.6,-10) AG11(-2.8,-10) AG12(-2,-10) AG13(-1.2,-10) AG14(-0.4,-10) AG15(0.4,-10) AG16(1.2,-10) AG17(2,-10) AG18(2.8,-10) AG19(3.6,-10) AG20(4.4,-10) AG21(5.2,-10) AG22(6,-10) AG23(6.8,-10) AG24(7.6,-10) AG25(8.4,-10) AG26(9.2,-10) AG27(10,-10) AG28(10.8,-10) AH1(-10.8,-10.8) AH2(-10,-10.8) AH3(-9.2,-10.8) AH4(-8.4,-10.8) AH5(-7.6,-10.8) AH6(-6.8,-10.8) AH7(-6,-10.8) AH8(-5.2,-10.8) AH9(-4.4,-10.8) AH10(-3.6,-10.8) AH11(-2.8,-10.8) AH12(-2,-10.8) AH13(-1.2,-10.8) AH14(-0.4,-10.8) AH15(0.4,-10.8) AH16(1.2,-10.8) AH17(2,-10.8) AH18(2.8,-10.8) AH19(3.6,-10.8) AH20(4.4,-10.8) AH21(5.2,-10.8) AH22(6,-10.8) AH23(6.8,-10.8) AH24(7.6,-10.8) AH25(8.4,-10.8) AH26(9.2,-10.8) AH27(10,-10.8) AH28(10.8,-10.8) B1(-10.8,10) B2(-10,10) B3(-9.2,10) B4(-8.4,10) B5(-7.6,10) B6(-6.8,10) B7(-6,10) B8(-5.2,10) B9(-4.4,10) B10(-3.6,10) B11(-2.8,10) B12(-2,10) B13(-1.2,10) B14(-0.4,10) B15(0.4,10) B16(1.2,10) B17(2,10) B18(2.8,10) B19(3.6,10) B20(4.4,10) B21(5.2,10) B22(6,10) B23(6.8,10) B24(7.6,10) B25(8.4,10) B26(9.2,10) B27(10,10) B28(10.8,10) C1(-10.8,9.2) C2(-10,9.2) C3(-9.2,9.2) C4(-8.4,9.2) C5(-7.6,9.2) C6(-6.8,9.2) C7(-6,9.2) C8(-5.2,9.2) C9(-4.4,9.2) C10(-3.6,9.2) C11(-2.8,9.2) C12(-2,9.2) C13(-1.2,9.2) C14(-0.4,9.2) C15(0.4,9.2) C16(1.2,9.2) C17(2,9.2) C18(2.8,9.2) C19(3.6,9.2) C20(4.4,9.2) C21(5.2,9.2) C22(6,9.2) C23(6.8,9.2) C24(7.6,9.2) C25(8.4,9.2) C26(9.2,9.2) C27(10,9.2) C28(10.8,9.2) D1(-10.8,8.4) D2(-10,8.4) D3(-9.2,8.4) D4(-8.4,8.4) D5(-7.6,8.4) D6(-6.8,8.4) D7(-6,8.4) D8(-5.2,8.4) D9(-4.4,8.4) D10(-3.6,8.4) D11(-2.8,8.4) D12(-2,8.4) D13(-1.2,8.4) D14(-0.4,8.4) D15(0.4,8.4) D16(1.2,8.4) D17(2,8.4) D18(2.8,8.4) D19(3.6,8.4) D20(4.4,8.4) D21(5.2,8.4) D22(6,8.4) D23(6.8,8.4) D24(7.6,8.4) D25(8.4,8.4) D26(9.2,8.4) D27(10,8.4) D28(10.8,8.4) E1(-10.8,7.6) E2(-10,7.6) E3(-9.2,7.6) E4(-8.4,7.6) E5(-7.6,7.6) E6(-6.8,7.6) E7(-6,7.6) E8(-5.2,7.6) E9(-4.4,7.6) E10(-3.6,7.6) E11(-2.8,7.6) E12(-2,7.6) E13(-1.2,7.6) E14(-0.4,7.6) E15(0.4,7.6) E16(1.2,7.6) E17(2,7.6) E18(2.8,7.6) E19(3.6,7.6) E20(4.4,7.6) E21(5.2,7.6) E22(6,7.6) E23(6.8,7.6) E24(7.6,7.6) E25(8.4,7.6) E26(9.2,7.6) E27(10,7.6) E28(10.8,7.6) F1(-10.8,6.8) F2(-10,6.8) F3(-9.2,6.8) F4(-8.4,6.8) F5(-7.6,6.8) F6(-6.8,6.8) F7(-6,6.8) F8(-5.2,6.8) F9(-4.4,6.8) F10(-3.6,6.8) F11(-2.8,6.8) F12(-2,6.8) F13(-1.2,6.8) F14(-0.4,6.8) F15(0.4,6.8) F16(1.2,6.8) F17(2,6.8) F18(2.8,6.8) F19(3.6,6.8) F20(4.4,6.8) F21(5.2,6.8) F22(6,6.8) F23(6.8,6.8) F24(7.6,6.8) F25(8.4,6.8) F26(9.2,6.8) F27(10,6.8) F28(10.8,6.8) G1(-10.8,6) G2(-10,6) G3(-9.2,6) G4(-8.4,6) G5(-7.6,6) G6(-6.8,6) G7(-6,6) G8(-5.2,6) G9(-4.4,6) G10(-3.6,6) G11(-2.8,6) G12(-2,6) G13(-1.2,6) G14(-0.4,6) G15(0.4,6) G16(1.2,6) G17(2,6) G18(2.8,6) G19(3.6,6) G20(4.4,6) G21(5.2,6) G22(6,6) G23(6.8,6) G24(7.6,6) G25(8.4,6) G26(9.2,6) G27(10,6) G28(10.8,6) H1(-10.8,5.2) H2(-10,5.2) H3(-9.2,5.2) H4(-8.4,5.2) H5(-7.6,5.2) H6(-6.8,5.2) H7(-6,5.2) H8(-5.2,5.2) H9(-4.4,5.2) H10(-3.6,5.2) H11(-2.8,5.2) H12(-2,5.2) H13(-1.2,5.2) H14(-0.4,5.2) H15(0.4,5.2) H16(1.2,5.2) H17(2,5.2) H18(2.8,5.2) H19(3.6,5.2) H20(4.4,5.2) H21(5.2,5.2) H22(6,5.2) H23(6.8,5.2) H24(7.6,5.2) H25(8.4,5.2) H26(9.2,5.2) H27(10,5.2) H28(10.8,5.2) J1(-10.8,4.4) J2(-10,4.4) J3(-9.2,4.4) J4(-8.4,4.4) J5(-7.6,4.4) J6(-6.8,4.4) J7(-6,4.4) J8(-5.2,4.4) J9(-4.4,4.4) J10(-3.6,4.4) J11(-2.8,4.4) J12(-2,4.4) J13(-1.2,4.4) J14(-0.4,4.4) J15(0.4,4.4) J16(1.2,4.4) J17(2,4.4) J18(2.8,4.4) J19(3.6,4.4) J20(4.4,4.4) J21(5.2,4.4) J22(6,4.4) J23(6.8,4.4) J24(7.6,4.4) J25(8.4,4.4) J26(9.2,4.4) J27(10,4.4) J28(10.8,4.4) K1(-10.8,3.6) K2(-10,3.6) K3(-9.2,3.6) K4(-8.4,3.6) K5(-7.6,3.6) K6(-6.8,3.6) K7(-6,3.6) K8(-5.2,3.6) K9(-4.4,3.6) K10(-3.6,3.6) K11(-2.8,3.6) K12(-2,3.6) K13(-1.2,3.6) K14(-0.4,3.6) K15(0.4,3.6) K16(1.2,3.6) K17(2,3.6) K18(2.8,3.6) K19(3.6,3.6) K20(4.4,3.6) K21(5.2,3.6) K22(6,3.6) K23(6.8,3.6) K24(7.6,3.6) K25(8.4,3.6) K26(9.2,3.6) K27(10,3.6) K28(10.8,3.6) L1(-10.8,2.8) L2(-10,2.8) L3(-9.2,2.8) L4(-8.4,2.8) L5(-7.6,2.8) L6(-6.8,2.8) L7(-6,2.8) L8(-5.2,2.8) L9(-4.4,2.8) L10(-3.6,2.8) L11(-2.8,2.8) L12(-2,2.8) L13(-1.2,2.8) L14(-0.4,2.8) L15(0.4,2.8) L16(1.2,2.8) L17(2,2.8) L18(2.8,2.8) L19(3.6,2.8) L20(4.4,2.8) L21(5.2,2.8) L22(6,2.8) L23(6.8,2.8) L24(7.6,2.8) L25(8.4,2.8) L26(9.2,2.8) L27(10,2.8) L28(10.8,2.8) M1(-10.8,2) M2(-10,2) M3(-9.2,2) M4(-8.4,2) M5(-7.6,2) M6(-6.8,2) M7(-6,2) M8(-5.2,2) M9(-4.4,2) M10(-3.6,2) M11(-2.8,2) M12(-2,2) M13(-1.2,2) M14(-0.4,2) M15(0.4,2) M16(1.2,2) M17(2,2) M18(2.8,2) M19(3.6,2) M20(4.4,2) M21(5.2,2) M22(6,2) M23(6.8,2) M24(7.6,2) M25(8.4,2) M26(9.2,2) M27(10,2) M28(10.8,2) N1(-10.8,1.2) N2(-10,1.2) N3(-9.2,1.2) N4(-8.4,1.2) N5(-7.6,1.2) N6(-6.8,1.2) N7(-6,1.2) N8(-5.2,1.2) N9(-4.4,1.2) N10(-3.6,1.2) N11(-2.8,1.2) N12(-2,1.2) N13(-1.2,1.2) N14(-0.4,1.2) N15(0.4,1.2) N16(1.2,1.2) N17(2,1.2) N18(2.8,1.2) N19(3.6,1.2) N20(4.4,1.2) N21(5.2,1.2) N22(6,1.2) N23(6.8,1.2) N24(7.6,1.2) N25(8.4,1.2) N26(9.2,1.2) N27(10,1.2) N28(10.8,1.2) P1(-10.8,0.4) P2(-10,0.4) P3(-9.2,0.4) P4(-8.4,0.4) P5(-7.6,0.4) P6(-6.8,0.4) P7(-6,0.4) P8(-5.2,0.4) P9(-4.4,0.4) P10(-3.6,0.4) P11(-2.8,0.4) P12(-2,0.4) P13(-1.2,0.4) P14(-0.4,0.4) P15(0.4,0.4) P16(1.2,0.4) P17(2,0.4) P18(2.8,0.4) P19(3.6,0.4) P20(4.4,0.4) P21(5.2,0.4) P22(6,0.4) P23(6.8,0.4) P24(7.6,0.4) P25(8.4,0.4) P26(9.2,0.4) P27(10,0.4) P28(10.8,0.4) R1(-10.8,-0.4) R2(-10,-0.4) R3(-9.2,-0.4) R4(-8.4,-0.4) R5(-7.6,-0.4) R6(-6.8,-0.4) R7(-6,-0.4) R8(-5.2,-0.4) R9(-4.4,-0.4) R10(-3.6,-0.4) R11(-2.8,-0.4) R12(-2,-0.4) R13(-1.2,-0.4) R14(-0.4,-0.4) R15(0.4,-0.4) R16(1.2,-0.4) R17(2,-0.4) R18(2.8,-0.4) R19(3.6,-0.4) R20(4.4,-0.4) R21(5.2,-0.4) R22(6,-0.4) R23(6.8,-0.4) R24(7.6,-0.4) R25(8.4,-0.4) R26(9.2,-0.4) R27(10,-0.4) R28(10.8,-0.4) T1(-10.8,-1.2) T2(-10,-1.2) T3(-9.2,-1.2) T4(-8.4,-1.2) T5(-7.6,-1.2) T6(-6.8,-1.2) T7(-6,-1.2) T8(-5.2,-1.2) T9(-4.4,-1.2) T10(-3.6,-1.2) T11(-2.8,-1.2) T12(-2,-1.2) T13(-1.2,-1.2) T14(-0.4,-1.2) T15(0.4,-1.2) T16(1.2,-1.2) T17(2,-1.2) T18(2.8,-1.2) T19(3.6,-1.2) T20(4.4,-1.2) T21(5.2,-1.2) T22(6,-1.2) T23(6.8,-1.2) T24(7.6,-1.2) T25(8.4,-1.2) T26(9.2,-1.2) T27(10,-1.2) T28(10.8,-1.2) U1(-10.8,-2) U2(-10,-2) U3(-9.2,-2) U4(-8.4,-2) U5(-7.6,-2) U6(-6.8,-2) U7(-6,-2) U8(-5.2,-2) U9(-4.4,-2) U10(-3.6,-2) U11(-2.8,-2) U12(-2,-2) U13(-1.2,-2) U14(-0.4,-2) U15(0.4,-2) U16(1.2,-2) U17(2,-2) U18(2.8,-2) U19(3.6,-2) U20(4.4,-2) U21(5.2,-2) U22(6,-2) U23(6.8,-2) U24(7.6,-2) U25(8.4,-2) U26(9.2,-2) U27(10,-2) U28(10.8,-2) V1(-10.8,-2.8) V2(-10,-2.8) V3(-9.2,-2.8) V4(-8.4,-2.8) V5(-7.6,-2.8) V6(-6.8,-2.8) V7(-6,-2.8) V8(-5.2,-2.8) V9(-4.4,-2.8) V10(-3.6,-2.8) V11(-2.8,-2.8) V12(-2,-2.8) V13(-1.2,-2.8) V14(-0.4,-2.8) V15(0.4,-2.8) V16(1.2,-2.8) V17(2,-2.8) V18(2.8,-2.8) V19(3.6,-2.8) V20(4.4,-2.8) V21(5.2,-2.8) V22(6,-2.8) V23(6.8,-2.8) V24(7.6,-2.8) V25(8.4,-2.8) V26(9.2,-2.8) V27(10,-2.8) V28(10.8,-2.8) W1(-10.8,-3.6) W2(-10,-3.6) W3(-9.2,-3.6) W4(-8.4,-3.6) W5(-7.6,-3.6) W6(-6.8,-3.6) W7(-6,-3.6) W8(-5.2,-3.6) W9(-4.4,-3.6) W10(-3.6,-3.6) W11(-2.8,-3.6) W12(-2,-3.6) W13(-1.2,-3.6) W14(-0.4,-3.6) W15(0.4,-3.6) W16(1.2,-3.6) W17(2,-3.6) W18(2.8,-3.6) W19(3.6,-3.6) W20(4.4,-3.6) W21(5.2,-3.6) W22(6,-3.6) W23(6.8,-3.6) W24(7.6,-3.6) W25(8.4,-3.6) W26(9.2,-3.6) W27(10,-3.6) W28(10.8,-3.6) Y1(-10.8,-4.4) Y2(-10,-4.4) Y3(-9.2,-4.4) Y4(-8.4,-4.4) Y5(-7.6,-4.4) Y6(-6.8,-4.4) Y7(-6,-4.4) Y8(-5.2,-4.4) Y9(-4.4,-4.4) Y10(-3.6,-4.4) Y11(-2.8,-4.4) Y12(-2,-4.4) Y13(-1.2,-4.4) Y14(-0.4,-4.4) Y15(0.4,-4.4) Y16(1.2,-4.4) Y17(2,-4.4) Y18(2.8,-4.4) Y19(3.6,-4.4) Y20(4.4,-4.4) Y21(5.2,-4.4) Y22(6,-4.4) Y23(6.8,-4.4) Y24(7.6,-4.4) Y25(8.4,-4.4) Y26(9.2,-4.4) Y27(10,-4.4) Y28(10.8,-4.4)
Top Overlay:
  circle w0.25: c-12.15,11.35 r0.125
  region: -10.984,11.5 -11.5,10.984 -11.5,11.5
  lines w0.2: -11.5,10.984 -10.984,11.5 ; -11.5,-11.5 -11.5,11.5 11.5,11.5 11.5,-11.5 -11.5,-11.5
Top Courtyard:
  lines w0.025: -12.5,-12.5 -12.5,12.5 12.5,12.5 12.5,-12.5 -12.5,-12.5
Top Assembly:
  circle w0.05: c-10.3,10.3 r0.6
  lines w0.05: -11.5,-11.1 ccw(c-11.1,-11.1) -11.1,-11.5 ; -11.5,11.1 cw(c-11.1,11.1) -11.1,11.5 ; -11.45,-11.294 -11.45,-11.45 ; -11.45,11.294 -11.45,11.45 ; -11.294,-11.45 -11.45,-11.45 ; -11.294,11.45 -11.45,11.45 ; 11.1,-11.5 ccw(c11.1,-11.1) 11.5,-11.1 ; 11.1,11.5 cw(c11.1,11.1) 11.5,11.1 ; 11.294,-11.45 11.45,-11.45 ; 11.294,11.45 11.45,11.45 ; 11.45,-11.294 11.45,-11.45 ; 11.45,11.294 11.45,11.45 ; -11.5,-11.5 -11.45,-11.45 ; -11.5,-11.5 -11.5,11.5 ; -11.5,-11.5 11.5,-11.5 ; -11.5,11.5 -11.45,11.45 ; -11.5,11.5 11.5,11.5 ; -10.1,-8.55 ccw(c-8.55,-8.55) -8.55,-10.1 ; -10.1,-8.55 -10.1,8.55 ; -10.1,-8.55 -9.5,-8.55 ; -10.1,8.55 cw(c-8.55,8.55) -8.55,10.1 ; -10.1,8.55 -9.5,8.55 ; -9.5,-8.55 ccw(c-8.55,-8.55) -8.55,-9.5 ; -9.5,-8.55 -9.5,8.55 ; -9.5,8.55 cw(c-8.55,8.55) -8.55,9.5 ; -8.55,-10.1 8.55,-10.1 ; -8.55,-10.1 -8.55,-9.5 ; -8.55,-9.5 8.55,-9.5 ; -8.55,9.5 8.55,9.5 ; -8.55,9.5 -8.55,10.1 ; -8.55,10.1 8.55,10.1 ; 8.55,-10.1 ccw(c8.55,-8.55) 10.1,-8.55 ; 8.55,-10.1 8.55,-9.5 ; 8.55,-9.5 ccw(c8.55,-8.55) 9.5,-8.55 ; 8.55,9.5 cw(c8.55,8.55) 9.5,8.55 ; 8.55,9.5 8.55,10.1 ; 8.55,10.1 cw(c8.55,8.55) 10.1,8.55 ; 9.5,-8.55 10.1,-8.55 ; 9.5,-8.55 9.5,8.55 ; 9.5,8.55 10.1,8.55 ; 10.1,-8.55 10.1,8.55 ; 11.45,-11.45 11.5,-11.5 ; 11.45,11.45 11.5,11.5 ; 11.5,-11.5 11.5,11.5 ; -9.8,-8.55 ccw(c-8.55,-8.55) -8.55,-9.8 8.55,-9.8 ccw(c8.55,-8.55) 9.8,-8.55 9.8,8.55 ccw(c8.55,8.55) 8.55,9.8 -8.55,9.8 ccw(c-8.55,8.55) -9.8,8.55 -9.8,-8.55
  text ".Designator" at -11.274,-1.132 h5
3D body "SFVC784.x_t": height 3.12, standoff 0, extent -11.5,-11.5 11.5,11.5

## SLP1610P4 [mm] "Package for RClamp0522P"
height 0.43
pads (6):
  rect 0.675x0.25 smd paste+0 mask+0.02: 1(-0.437,0.5)
  rrect30% 0.675x0.25 smd paste+0 mask+0.02: 2(-0.437,0) 5(0.437,0) 6(0.437,0.5)
  rrect30% 0.675x0.4 smd paste+0 mask+0.02: 3(-0.437,-0.5) 4(0.437,-0.5)
Top Overlay:
  circle w0.2: c-1.092,1 r0.1
  lines w0.2: -0.5,-0.95 0.5,-0.95 ; -0.5,0.95 0.5,0.95
Top Solder:
  region: -0.15,-0.28 0.15,-0.28 0.15,-0.72 -0.15,-0.72
Top Courtyard:
  lines w0.025: -1.05,-1.05 -1.05,1.05 1.05,1.05 1.05,-1.05 -1.05,-1.05
Top Assembly:
  circle w0.05: c-0.33,0.63 r0.075
  lines w0.05: -0.5,-0.7 -0.51,-0.7 -0.51,-0.3 -0.5,-0.3 ; -0.5,-0.1 -0.51,-0.1 -0.51,0.1 -0.5,0.1 ; -0.5,0.4 -0.51,0.4 -0.51,0.6 -0.5,0.6 ; 0.5,-0.7 0.51,-0.7 0.51,-0.3 0.5,-0.3 ; 0.5,-0.1 0.51,-0.1 0.51,0.1 0.5,0.1 ; 0.5,0.4 0.51,0.4 0.51,0.6 0.5,0.6 ; -0.5,-0.8 0.5,-0.8 0.5,0.8 -0.5,0.8 -0.5,-0.8
  text ".Designator" at 0.226,-2.252 h1
3D body "RClamp0522P.STEP": height 0.6, standoff 0.02, extent -0.51,-0.8 0.51,0.8

## SLP2510P8 [mm] "Package for RClamp0524P"
height 0.43
pads (10):
  rect 0.675x0.25 smd paste+0 mask+0.02: 1(-0.437,1)
  rrect30% 0.675x0.25 smd paste+0 mask+0.02: 2(-0.437,0.5) 4(-0.437,-0.5) 5(-0.437,-1) 6(0.437,-1) 7(0.437,-0.5) 9(0.437,0.5) 10(0.437,1)
  rrect30% 0.675x0.4 smd paste+0 mask+0.02: 3(-0.437,0) 8(0.437,0)
Top Overlay:
  circle w0.2: c-1.092,1 r0.1
  lines w0.2: -0.5,-1.4 0.5,-1.4 ; -0.5,1.4 0.5,1.4
Top Solder:
  region: -0.15,0.22 0.15,0.22 0.15,-0.22 -0.15,-0.22
Top Courtyard:
  lines w0.025: -1.05,-1.5 -1.05,1.5 1.05,1.5 1.05,-1.5 -1.05,-1.5
Top Assembly:
  circle w0.05: c-0.33,1.08 r0.075
  lines w0.05: -0.5,-1.1 -0.51,-1.1 -0.51,-0.9 -0.5,-0.9 ; -0.5,-0.6 -0.51,-0.6 -0.51,-0.4 -0.5,-0.4 ; -0.5,-0.2 -0.51,-0.2 -0.51,0.2 -0.5,0.2 ; -0.5,0.4 -0.51,0.4 -0.51,0.6 -0.5,0.6 ; -0.5,0.9 -0.51,0.9 -0.51,1.1 -0.5,1.1 ; 0.5,-1.1 0.51,-1.1 0.51,-0.9 0.5,-0.9 ; 0.5,-0.6 0.51,-0.6 0.51,-0.4 0.5,-0.4 ; 0.5,-0.2 0.51,-0.2 0.51,0.2 0.5,0.2 ; 0.5,0.4 0.51,0.4 0.51,0.6 0.5,0.6 ; 0.5,0.9 0.51,0.9 0.51,1.1 0.5,1.1 ; -0.5,-1.25 0.5,-1.25 0.5,1.25 -0.5,1.25 -0.5,-1.25
  text ".Designator" at 0.226,-2.252 h1
3D body "RClamp0524P.STEP": height 0.6, standoff 0.02, extent -0.51,-1.25 0.51,1.25

## SOIC8_ATECC608A_With_UDFN8 [mm] "SOIC-8 package with UDFN-8 2mm x 3mm, 0.5mm pitch"
height 1.75
pads (17):
  rect 0.6x1.45 smd paste+0 mask+0.05: 1(-1.905,-2.725)
  rect 0.7x0.25 smd paste-1 mask+0.05: 1(-1.45,0.75)
  oval 0.7x0.25 smd paste-1 mask+0.05: 2(-1.45,0.25) 3(-1.45,-0.25) 4(-1.45,-0.75) 5(1.45,-0.75) 6(1.45,-0.25) 7(1.45,0.25) 8(1.45,0.75)
  oval 0.6x1.45 smd paste+0 mask+0.05: 2(-0.635,-2.725) 3(0.635,-2.725) 4(1.905,-2.725) 5(1.905,2.725) 6(0.635,2.725) 7(-0.635,2.725) 8(-1.905,2.725)
  rect 1.3x1.5 smd paste-2 mask+0.05: 4(0,0)
Top Overlay:
  circle w0.25: c-2.755,-2.725 r0.125
  circle w0.25: c-2.1,1.2 r0.125
  lines w0.2: -1.45,-1.25 1.45,-1.25 ; -1.45,1.25 1.45,1.25 ; -1.27,-3.556 -1.27,-1.601 ; -1.27,1.601 -1.27,3.556 ; 0,-3.556 0,-1.601 ; 0,1.601 0,3.556 ; 1.27,-3.556 1.27,-1.601 ; 1.27,1.601 1.27,3.556 ; -2.5,-1.6 2.5,-1.6 2.5,1.6 -2.5,1.6 -2.5,-1.6
Top Courtyard:
  lines w0.025: -2.75,-3.8 -2.75,3.8 2.75,3.8 2.75,-3.8 -2.75,-3.8
Top Assembly:
  drawing of 155 lines, arcs and shapes, not listed
  text ".Designator" at -2.815,-0.283 h1.25
3D body "SOIC8_JEDEC_MS012.x_t": height 1.43, standoff 0, extent -2.45,-3 2.45,3

## SOIC8_WITH_VSON10 [mm] "SOIC, 8-Leads, Body 3.90x4.90mm, Pitch 1.27mm with DRC0010J footprint"
height 1.75
pads (23):
  rect 1.45x0.6 smd paste+0 mask+0.05: 1(-2.725,1.905)
  oval 1.45x0.6 smd paste+0 mask+0.05: 2(-2.725,0.635) 3(-2.725,-0.635) 4(-2.725,-1.905) 5(2.725,-1.905) 6(2.725,-0.635) 7(2.725,0.635) 8(2.725,1.905)
  rect 0.25x0.6 smd paste-1 mask+0.05: A.1(-1,-1.4)
  rrect50% 0.25x0.6 smd paste-1 mask+0.05: A.2(-0.5,-1.4) A.3(0,-1.4) A.4(0.5,-1.4) A.5(1,-1.4) A.6(1,1.4) A.7(0.5,1.4) A.8(0,1.4) A.9(-0.5,1.4) A.10(-1,1.4)
  rrect50% 0.6x0.25 smd paste-2 mask+0.05: A.EP(-1.4,-0.25) A.EP(-1.4,0.25) A.EP(1.4,-0.25) A.EP(1.4,0.25)
  rrect10% 2.4x1.65 smd paste-2 mask+0.05: A.EP(0,0)
Top Overlay:
  circle w0.25: c-1.5,-2.2 r0.125
  circle w0.25: c-2.725,2.755 r0.125
  lines w0.2: -3.556,-1.27 -1.706,-1.27 ; -3.556,0 -1.956,0 ; -3.556,1.27 -1.706,1.27 ; -1.7,-0.7 -1.7,-1.7 -1.4,-1.7 ; -1.7,0.7 -1.7,1.7 -1.4,1.7 ; -1.6,-2.7 1.6,-2.7 ; -1.6,2.7 1.6,2.7 ; 1.4,-1.7 1.7,-1.7 1.7,-0.7 ; 1.4,1.7 1.7,1.7 1.7,0.7 ; 1.706,-1.27 3.556,-1.27 ; 1.706,1.27 3.556,1.27 ; 1.956,0 3.556,0
Top Courtyard:
  lines w0.025: -3.95,-3.1 -3.95,3.1 3.95,3.1 3.95,-3.1 -3.95,-3.1
Top Assembly:
  drawing of 202 lines, arcs and shapes, not listed
  text ".Designator" at 0.453,-4.511 h2
3D body "SOIC8_JEDEC_MS012.x_t": height 1.43, standoff 0, extent -3,-2.45 3,2.45

## SOIC8EP_R-PDSO-G8 [mm] "Power SOIC-8 package with exponsed pad"
height 1.7
pads (9):
  rect 1.45x0.6 smd paste+0 mask+0.05: 1(-2.725,1.905)
  oval 1.45x0.6 smd paste+0 mask+0.05: 2(-2.725,0.635) 3(-2.725,-0.635) 4(-2.725,-1.905) 5(2.725,-1.905) 6(2.725,-0.635) 7(2.725,0.635) 8(2.725,1.905)
  rrect10% 2.56x3.45 smd paste-50 mask+0.05: EP(0,0)
Top Overlay:
  circle w0.25: c-2.725,2.755 r0.125
  lines w0.2: -3.5,-1.27 -1.7,-1.27 ; -3.5,0 -1.7,0 ; -3.5,1.27 -1.7,1.27 ; 1.7,-1.27 3.5,-1.27 ; 1.7,0 3.5,0 ; 1.7,1.27 3.5,1.27 ; -1.7,-2.5 -1.7,2.5 1.7,2.5 1.7,-2.5 -1.7,-2.5
Top Paste:
  rectangle: -1.3,-0.25 -0.8,0.25
  region: 0.6,0.25 0.1,0.25 0.1,-0.25 0.6,-0.25
  rectangle: -0.6,-0.25 -0.1,0.25
  rectangle: 0.8,-0.25 1.3,0.25
  rectangle: -1.3,0.45 -0.8,0.95
  region: 0.6,0.95 0.1,0.95 0.1,0.45 0.6,0.45
  rectangle: -0.6,0.45 -0.1,0.95
  rectangle: 0.8,0.45 1.3,0.95
  rectangle: -1.3,1.15 -0.8,1.65
  region: 0.6,1.65 0.1,1.65 0.1,1.15 0.6,1.15
  rectangle: -0.6,1.15 -0.1,1.65
  rectangle: 0.8,1.15 1.3,1.65
  region: 1.3,-0.45 0.8,-0.45 0.8,-0.95 1.3,-0.95
  rectangle: -0.6,-0.95 -0.1,-0.45
  region: 0.6,-0.45 0.1,-0.45 0.1,-0.95 0.6,-0.95
  region: -0.8,-0.45 -1.3,-0.45 -1.3,-0.95 -0.8,-0.95
  region: 1.3,-1.15 0.8,-1.15 0.8,-1.65 1.3,-1.65
  rectangle: -0.6,-1.65 -0.1,-1.15
  region: 0.6,-1.15 0.1,-1.15 0.1,-1.65 0.6,-1.65
  region: -0.8,-1.15 -1.3,-1.15 -1.3,-1.65 -0.8,-1.65
Top Courtyard:
  lines w0.025: -3.75,-2.85 -3.75,2.85 3.75,2.85 3.75,-2.85 -3.75,-2.85
Top Assembly:
  circle w0.05: c-1.225,1.784 r0.216
  lines w0.05: -2.889,-2.121 -2.502,-2.121 ; -2.889,-2.121 -2.889,-1.715 ; -2.889,-2.121 -2.889,-1.715 ; -2.889,-2.121 -1.867,-2.121 ; -2.889,-1.715 -2.502,-1.715 ; -2.889,-1.715 -1.867,-1.715 ; -2.889,-0.851 -2.502,-0.851 ; -2.889,-0.851 -2.889,-0.445 ; -2.889,-0.851 -2.889,-0.445 ; -2.889,-0.851 -1.867,-0.851 ; -2.889,-0.445 -2.502,-0.445 ; -2.889,-0.445 -1.867,-0.445 ; -2.889,0.419 -2.502,0.419 ; -2.889,0.419 -2.889,0.826 ; -2.889,0.419 -2.889,0.826 ; -2.889,0.419 -1.867,0.419 ; -2.889,0.826 -2.502,0.825 ; -2.889,0.826 -1.867,0.825 ; -2.889,1.689 -2.502,1.689 ; -2.889,1.689 -2.889,2.095 ; -2.889,1.689 -2.889,2.095 ; -2.889,1.689 -1.867,1.689 ; -2.889,2.095 -2.502,2.095 ; -2.889,2.095 -1.867,2.095 ; -2.502,-2.121 -2.502,-1.715 ; -2.502,-2.121 -2.261,-2.121 ; -2.502,-1.715 -2.261,-1.715 ; -2.502,-0.851 -2.502,-0.445 ; -2.502,-0.851 -2.261,-0.851 ; -2.502,-0.445 -2.261,-0.445 ; -2.502,0.419 -2.502,0.825 ; -2.502,0.419 -2.261,0.419 ; -2.502,0.825 -2.261,0.826 ; -2.502,1.689 -2.502,2.095 ; -2.502,1.689 -2.261,1.689 ; -2.502,2.095 -2.261,2.095 ; -2.261,-2.121 -2.261,-1.715 ; -2.261,-2.121 -2.019,-2.121 ; -2.261,-1.715 -2.019,-1.715 ; -2.261,-0.851 -2.261,-0.445 ; -2.261,-0.851 -2.019,-0.851 ; -2.261,-0.445 -2.019,-0.445 ; -2.261,0.419 -2.261,0.826 ; -2.261,0.419 -2.019,0.419 ; -2.261,0.826 -2.019,0.825 ; -2.261,1.689 -2.261,2.095 ; -2.261,1.689 -2.019,1.689 ; -2.261,2.095 -2.019,2.095 ; -2.019,-2.121 -2.019,-1.715 ; -2.019,-2.121 -1.867,-2.121 ; -2.019,-1.715 -1.867,-1.715 ; -2.019,-0.851 -2.019,-0.445 ; -2.019,-0.851 -1.867,-0.851 ; -2.019,-0.445 -1.867,-0.445 ; -2.019,0.419 -2.019,0.825 ; -2.019,0.419 -1.867,0.419 ; -2.019,0.825 -1.867,0.825 ; -2.019,1.689 -2.019,2.095 ; -2.019,1.689 -1.867,1.689 ; -2.019,2.095 -1.867,2.095 ; -1.867,-2.451 1.867,-2.451 ; -1.867,-2.451 -1.682,-2.266 ; -1.867,-2.451 -1.867,2.451 ; -1.867,-2.451 -1.867,-2.121 ; -1.867,-2.451 1.867,-2.451 ; -1.867,-1.715 -1.867,-0.851 ; -1.867,-0.445 -1.867,0.419 ; -1.867,0.825 -1.867,1.689 ; -1.867,2.095 -1.867,2.451 ; -1.867,2.451 1.867,2.451 ; -1.867,2.451 -1.682,2.266 ; -1.867,2.451 1.867,2.451 ; -1.682,-2.266 1.682,-2.266 ; -1.682,-2.266 -1.682,2.266 ; -1.682,2.266 1.682,2.266 ; 1.682,-2.266 1.867,-2.451 ; 1.682,-2.266 1.682,2.266 ; 1.682,2.266 1.867,2.451 ; 1.867,-2.451 1.867,2.451 ; 1.867,-2.451 1.867,-2.121 ; 1.867,-2.121 2.019,-2.121 ; 1.867,-2.121 2.889,-2.121 ; 1.867,-1.715 2.019,-1.715 ; 1.867,-1.715 2.889,-1.715 ; 1.867,-1.715 1.867,-0.851 ; 1.867,-0.851 2.019,-0.851 ; 1.867,-0.851 2.889,-0.851 ; 1.867,-0.445 2.019,-0.445 ; 1.867,-0.445 2.889,-0.445 ; 1.867,-0.445 1.867,0.419 ; 1.867,0.419 2.019,0.419 ; 1.867,0.419 2.889,0.419 ; 1.867,0.825 2.019,0.826 ; 1.867,0.825 2.889,0.825 ; 1.867,0.825 1.867,1.689 ; 1.867,1.689 2.019,1.689 ; 1.867,1.689 2.889,1.689 ; 1.867,2.095 2.019,2.095 ; 1.867,2.095 2.889,2.095 ; 1.867,2.095 1.867,2.451 ; 2.019,-2.121 2.019,-1.715 ; 2.019,-2.121 2.261,-2.121 ; 2.019,-1.715 2.261,-1.715 ; 2.019,-0.851 2.019,-0.445 ; 2.019,-0.851 2.261,-0.851 ; 2.019,-0.445 2.261,-0.445 ; 2.019,0.419 2.019,0.826 ; 2.019,0.419 2.261,0.419 ; 2.019,0.826 2.261,0.826 ; 2.019,1.689 2.019,2.095 ; 2.019,1.689 2.261,1.689 ; 2.019,2.095 2.261,2.095 ; 2.261,-2.121 2.502,-2.121 ; 2.261,-2.121 2.261,-1.715 ; 2.261,-1.715 2.502,-1.715 ; 2.261,-0.851 2.502,-0.851 ; 2.261,-0.851 2.261,-0.445 ; 2.261,-0.445 2.502,-0.445 ; 2.261,0.419 2.502,0.419 ; 2.261,0.419 2.261,0.826 ; 2.261,0.826 2.502,0.825 ; 2.261,1.689 2.502,1.689 ; 2.261,1.689 2.261,2.095 ; 2.261,2.095 2.502,2.095 ; 2.502,-2.121 2.502,-1.715 ; 2.502,-2.121 2.889,-2.121 ; 2.502,-1.715 2.889,-1.715 ; 2.502,-0.851 2.502,-0.445 ; 2.502,-0.851 2.889,-0.851 ; 2.502,-0.445 2.889,-0.445 ; 2.502,0.419 2.502,0.825 ; 2.502,0.419 2.889,0.419 ; 2.502,0.825 2.889,0.825 ; 2.502,1.689 2.502,2.095 ; 2.502,1.689 2.889,1.689 ; 2.502,2.095 2.889,2.095 ; 2.889,-2.121 2.889,-1.715 ; 2.889,-2.121 2.889,-1.715 ; 2.889,-0.851 2.889,-0.445 ; 2.889,-0.851 2.889,-0.445 ; 2.889,0.419 2.889,0.825 ; 2.889,0.419 2.889,0.825 ; 2.889,1.689 2.889,2.095 ; 2.889,1.689 2.889,2.095
  text ".Designator" at 0.453,-4.511 h2
3D body "R-PDSO-G8.x_t": height 1.43, standoff 0, extent -3,-2.45 3,2.45

## SOIC8EP_RD-8-3_HMC361 [mm] "Power SOIC-8 package with exponsed pad. AD case RD-8-3. Compliant to JEDEC standards MS-012-BA"
height 1.7
pads (9):
  rect 1.45x0.6 smd paste+0 mask+0.05: 1(-2.725,1.905)
  oval 1.45x0.6 smd paste+0 mask+0.05: 2(-2.725,0.635) 3(-2.725,-0.635) 4(-2.725,-1.905) 5(2.725,-1.905) 6(2.725,-0.635) 7(2.725,0.635) 8(2.725,1.905)
  rrect10% 2.5x3.5 smd paste-50 mask+0.05: EP(0,0)
Top Overlay:
  circle w0.25: c-2.725,2.755 r0.125
  lines w0.2: -3.5,-1.27 -1.7,-1.27 ; -3.5,0 -1.7,0 ; -3.5,1.27 -1.7,1.27 ; 1.7,-1.27 3.5,-1.27 ; 1.7,0 3.5,0 ; 1.7,1.27 3.5,1.27 ; -1.7,-2.5 -1.7,2.5 1.7,2.5 1.7,-2.5 -1.7,-2.5
Top Paste:
  region: -0.15,0.45 -1.05,0.45 -1.05,-0.45 -0.15,-0.45
  region: 1.05,0.45 0.15,0.45 0.15,-0.45 1.05,-0.45
  region: -0.15,1.65 -1.05,1.65 -1.05,0.75 -0.15,0.75
  region: 1.05,1.65 0.15,1.65 0.15,0.75 1.05,0.75
  region: -0.15,-0.75 -1.05,-0.75 -1.05,-1.65 -0.15,-1.65
  region: 1.05,-0.75 0.15,-0.75 0.15,-1.65 1.05,-1.65
Top Courtyard:
  lines w0.025: -3.75,-2.85 -3.75,2.85 3.75,2.85 3.75,-2.85 -3.75,-2.85
Top Assembly:
  circle w0.05: c-1.225,1.784 r0.216
  lines w0.05: -2.889,-2.121 -2.502,-2.121 ; -2.889,-2.121 -2.889,-1.715 ; -2.889,-2.121 -2.889,-1.715 ; -2.889,-2.121 -1.867,-2.121 ; -2.889,-1.715 -2.502,-1.715 ; -2.889,-1.715 -1.867,-1.715 ; -2.889,-0.851 -2.502,-0.851 ; -2.889,-0.851 -2.889,-0.445 ; -2.889,-0.851 -2.889,-0.445 ; -2.889,-0.851 -1.867,-0.851 ; -2.889,-0.445 -2.502,-0.445 ; -2.889,-0.445 -1.867,-0.445 ; -2.889,0.419 -2.502,0.419 ; -2.889,0.419 -2.889,0.826 ; -2.889,0.419 -2.889,0.826 ; -2.889,0.419 -1.867,0.419 ; -2.889,0.826 -2.502,0.825 ; -2.889,0.826 -1.867,0.825 ; -2.889,1.689 -2.502,1.689 ; -2.889,1.689 -2.889,2.095 ; -2.889,1.689 -2.889,2.095 ; -2.889,1.689 -1.867,1.689 ; -2.889,2.095 -2.502,2.095 ; -2.889,2.095 -1.867,2.095 ; -2.502,-2.121 -2.502,-1.715 ; -2.502,-2.121 -2.261,-2.121 ; -2.502,-1.715 -2.261,-1.715 ; -2.502,-0.851 -2.502,-0.445 ; -2.502,-0.851 -2.261,-0.851 ; -2.502,-0.445 -2.261,-0.445 ; -2.502,0.419 -2.502,0.825 ; -2.502,0.419 -2.261,0.419 ; -2.502,0.825 -2.261,0.826 ; -2.502,1.689 -2.502,2.095 ; -2.502,1.689 -2.261,1.689 ; -2.502,2.095 -2.261,2.095 ; -2.261,-2.121 -2.261,-1.715 ; -2.261,-2.121 -2.019,-2.121 ; -2.261,-1.715 -2.019,-1.715 ; -2.261,-0.851 -2.261,-0.445 ; -2.261,-0.851 -2.019,-0.851 ; -2.261,-0.445 -2.019,-0.445 ; -2.261,0.419 -2.261,0.826 ; -2.261,0.419 -2.019,0.419 ; -2.261,0.826 -2.019,0.825 ; -2.261,1.689 -2.261,2.095 ; -2.261,1.689 -2.019,1.689 ; -2.261,2.095 -2.019,2.095 ; -2.019,-2.121 -2.019,-1.715 ; -2.019,-2.121 -1.867,-2.121 ; -2.019,-1.715 -1.867,-1.715 ; -2.019,-0.851 -2.019,-0.445 ; -2.019,-0.851 -1.867,-0.851 ; -2.019,-0.445 -1.867,-0.445 ; -2.019,0.419 -2.019,0.825 ; -2.019,0.419 -1.867,0.419 ; -2.019,0.825 -1.867,0.825 ; -2.019,1.689 -2.019,2.095 ; -2.019,1.689 -1.867,1.689 ; -2.019,2.095 -1.867,2.095 ; -1.867,-2.451 1.867,-2.451 ; -1.867,-2.451 -1.682,-2.266 ; -1.867,-2.451 -1.867,2.451 ; -1.867,-2.451 -1.867,-2.121 ; -1.867,-2.451 1.867,-2.451 ; -1.867,-1.715 -1.867,-0.851 ; -1.867,-0.445 -1.867,0.419 ; -1.867,0.825 -1.867,1.689 ; -1.867,2.095 -1.867,2.451 ; -1.867,2.451 1.867,2.451 ; -1.867,2.451 -1.682,2.266 ; -1.867,2.451 1.867,2.451 ; -1.682,-2.266 1.682,-2.266 ; -1.682,-2.266 -1.682,2.266 ; -1.682,2.266 1.682,2.266 ; 1.682,-2.266 1.867,-2.451 ; 1.682,-2.266 1.682,2.266 ; 1.682,2.266 1.867,2.451 ; 1.867,-2.451 1.867,2.451 ; 1.867,-2.451 1.867,-2.121 ; 1.867,-2.121 2.019,-2.121 ; 1.867,-2.121 2.889,-2.121 ; 1.867,-1.715 2.019,-1.715 ; 1.867,-1.715 2.889,-1.715 ; 1.867,-1.715 1.867,-0.851 ; 1.867,-0.851 2.019,-0.851 ; 1.867,-0.851 2.889,-0.851 ; 1.867,-0.445 2.019,-0.445 ; 1.867,-0.445 2.889,-0.445 ; 1.867,-0.445 1.867,0.419 ; 1.867,0.419 2.019,0.419 ; 1.867,0.419 2.889,0.419 ; 1.867,0.825 2.019,0.826 ; 1.867,0.825 2.889,0.825 ; 1.867,0.825 1.867,1.689 ; 1.867,1.689 2.019,1.689 ; 1.867,1.689 2.889,1.689 ; 1.867,2.095 2.019,2.095 ; 1.867,2.095 2.889,2.095 ; 1.867,2.095 1.867,2.451 ; 2.019,-2.121 2.019,-1.715 ; 2.019,-2.121 2.261,-2.121 ; 2.019,-1.715 2.261,-1.715 ; 2.019,-0.851 2.019,-0.445 ; 2.019,-0.851 2.261,-0.851 ; 2.019,-0.445 2.261,-0.445 ; 2.019,0.419 2.019,0.826 ; 2.019,0.419 2.261,0.419 ; 2.019,0.826 2.261,0.826 ; 2.019,1.689 2.019,2.095 ; 2.019,1.689 2.261,1.689 ; 2.019,2.095 2.261,2.095 ; 2.261,-2.121 2.502,-2.121 ; 2.261,-2.121 2.261,-1.715 ; 2.261,-1.715 2.502,-1.715 ; 2.261,-0.851 2.502,-0.851 ; 2.261,-0.851 2.261,-0.445 ; 2.261,-0.445 2.502,-0.445 ; 2.261,0.419 2.502,0.419 ; 2.261,0.419 2.261,0.826 ; 2.261,0.826 2.502,0.825 ; 2.261,1.689 2.502,1.689 ; 2.261,1.689 2.261,2.095 ; 2.261,2.095 2.502,2.095 ; 2.502,-2.121 2.502,-1.715 ; 2.502,-2.121 2.889,-2.121 ; 2.502,-1.715 2.889,-1.715 ; 2.502,-0.851 2.502,-0.445 ; 2.502,-0.851 2.889,-0.851 ; 2.502,-0.445 2.889,-0.445 ; 2.502,0.419 2.502,0.825 ; 2.502,0.419 2.889,0.419 ; 2.502,0.825 2.889,0.825 ; 2.502,1.689 2.502,2.095 ; 2.502,1.689 2.889,1.689 ; 2.502,2.095 2.889,2.095 ; 2.889,-2.121 2.889,-1.715 ; 2.889,-2.121 2.889,-1.715 ; 2.889,-0.851 2.889,-0.445 ; 2.889,-0.851 2.889,-0.445 ; 2.889,0.419 2.889,0.825 ; 2.889,0.419 2.889,0.825 ; 2.889,1.689 2.889,2.095 ; 2.889,1.689 2.889,2.095
  text ".Designator" at 0.453,-4.511 h2
3D body "SOIC8_RD_8_3_HMC361.x_t": height 1.43, standoff 0, extent -3,-2.45 3,2.45